# Altium schematic symbol library R_10K.SchLib: 1 symbol
Pins are listed as number, name and electrical type; pins without a type are passive.

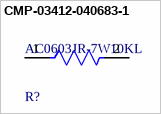
[diagram p0: symbol CMP-03412-040683-1]

## CMP-03412-040683-1
designator R?, comment AC0603JR-7W10KL
RES 10kΩ 5.00% 0.2W 0603
footprint FP-AC0603-IPC_C
footprint FP-AC0603-IPC_B
footprint FP-AC0603-MFG
footprint FP-AC0603-IPC_A
pins: 1, 2